# Altium schematic symbol library EEE-FK0J221P.SchLib: 1 symbol
Pins are listed as number, name and electrical type; pins without a type are passive.

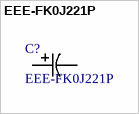
[diagram p0: symbol EEE-FK0J221P]

## EEE-FK0J221P
designator C?
No Description Available; Manufacturer_Name: Panasonic; Copyright: Copyright (C) 2026 Ultra Librarian. All rights reserved.; Manufacturer_Part_Number: EEE-FK0J221P
footprint CAP_EEFK_D_PAN
pins: 1, 2